# Altium schematic symbol library Display.SchLib: 6 symbols
Pins are listed as number, name and electrical type; pins without a type are passive.

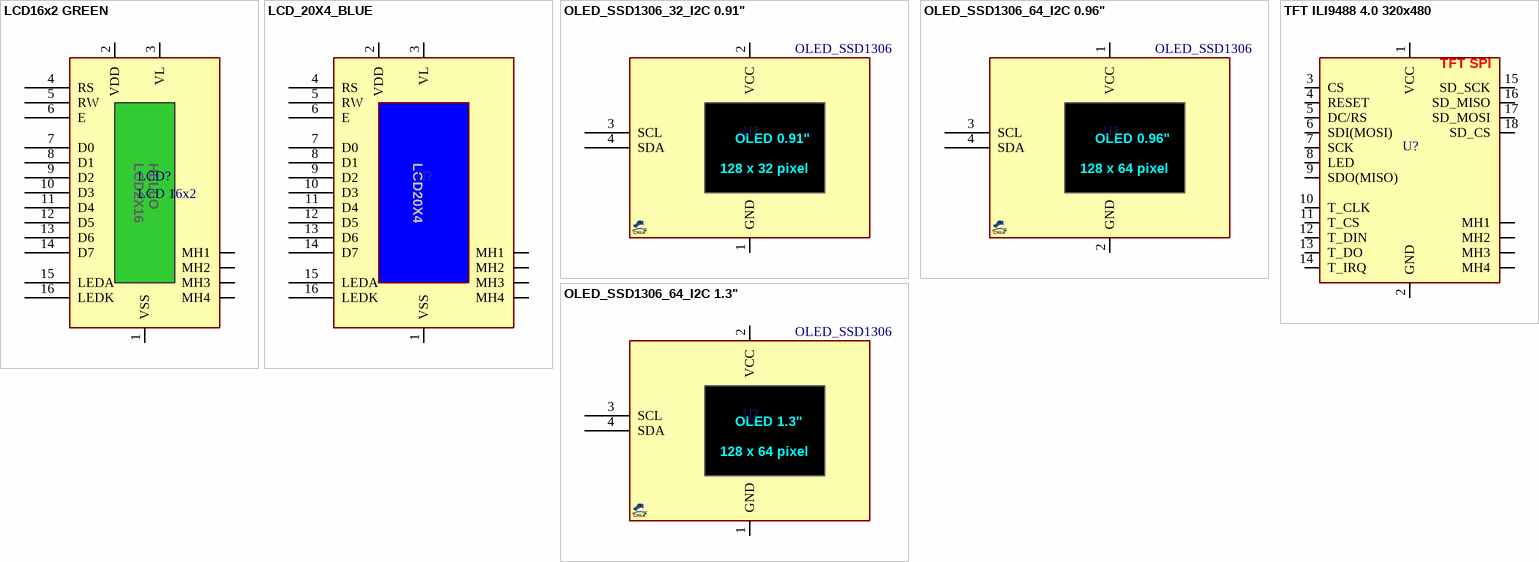
[diagram p0: symbols LCD16x2 GREEN to TFT ILI9488 4.0 320x480]

## LCD16x2 GREEN
designator LCD?, comment LCD 16x2
Code: 8300-012
footprint LCD_16x2
footprint LCD_16x2 HDR
pins: 1 VSS, 2 VDD, 3 VL, 4 RS, 5 RW, 6 E, 7 D0, 8 D1, 9 D2, 10 D3, 11 D4, 12 D5, 13 D6, 14 D7, 15 LEDA, 16 LEDK, MH1, MH2, MH3, MH4
text: LCD2X16; HELLO

## LCD_20X4_BLUE
designator U?, comment LCD_20X4  (value not drawn)
LCD Character Disp, 20X4; Designed by: TranLuyen; Code: 8300-010; Code_sub1: 3504-028 x 0.4pcs
footprint LCD_20x4 (93*55mm)
pins: 1 VSS, 2 VDD, 3 VL, 4 RS, 5 RW, 6 E, 7 D0, 8 D1, 9 D2, 10 D3, 11 D4, 12 D5, 13 D6, 14 D7, 15 LEDA, 16 LEDK, MH1, MH2, MH3, MH4
text: LCD20X4

## OLED_SSD1306_32_I2C 0.91"
designator U?, comment value OLED_SSD1306  (hidden comment: OLED 128x64 I2C)
OLED, SSD1306, 0.96", 128X64, BREAKOUT I2C; MANF_P#: OLED_SSD1306_I2C; PARAM2: 3.3/5VCC, -20~70oC; PARAM: 2 Colors, 0.96", 128X64; MANF: -
footprint OLED_SSD1306_128x32_I2C (OLED SS1306 Breakout, 128X64, I2C)
pins: 1 GND, 2 VCC, 3 SCL, 4 SDA
text: OLED 0.91"; 128 x 32 pixel

## OLED_SSD1306_64_I2C 0.96"
designator U?, comment value OLED_SSD1306  (hidden comment: OLED 128x64 I2C)
OLED, SSD1306, 0.96", 128X64, BREAKOUT I2C; MANF_P#: OLED_SSD1306_I2C; PARAM2: 3.3/5VCC, -20~70oC; PARAM: 2 Colors, 0.96", 128X64; MANF: -
footprint OLED_SSD1306_128x64_I2C (OLED SS1306 Breakout, 128X64, I2C)
pins: 1 VCC, 2 GND, 3 SCL, 4 SDA
text: OLED 0.96"; 128 x 64 pixel

## OLED_SSD1306_64_I2C 1.3"
designator U?, comment value OLED_SSD1306  (hidden comment: OLED 128x64 I2C)
OLED, SSD1306, 0.96", 128X64, BREAKOUT I2C; MANF_P#: OLED_SSD1306_I2C; PARAM2: 3.3/5VCC, -20~70oC; PARAM: 2 Colors, 0.96", 128X64; MANF: -
footprint OLED_SSD1306_128x64_I2C 1.3" (OLED SS1306 Breakout, 128X64, I2C)
pins: 1 GND, 2 VCC, 3 SCL, 4 SDA
text: OLED 1.3"; 128 x 64 pixel

## TFT ILI9488 4.0 320x480
designator U?, comment LCD_20X4  (value not drawn)
TFT ILI9488 4.0 Inch 320x480 Pixel; Designed by: TranLuyen; Code: N/A
footprint TFT ILI9488 SPI 4 inch  480*320 (TFT 4/3.95 inch)
pins: 1 VCC, 2 GND, 3 CS, 4 RESET, 5 DC/RS, 6 SDI(MOSI), 7 SCK, 8 LED, 9 SDO(MISO), 10 T_CLK, 11 T_CS, 12 T_DIN, 13 T_DO, 14 T_IRQ, 15 SD_SCK, 16 SD_MISO, 17 SD_MOSI, 18 SD_CS, MH1, MH2, MH3, MH4
text: TFT SPI